# Altium schematic symbol library bspd.SchLib: 16 symbols
Pins are listed as number, name and electrical type; pins without a type are passive.

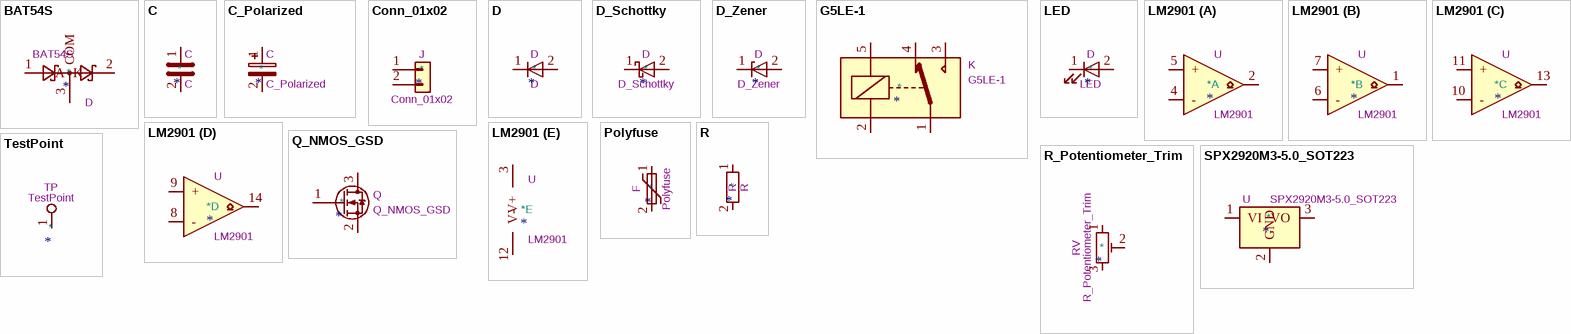
[diagram p0: symbols BAT54S to TestPoint]

## BAT54S
designator *  value BAT54S  Reference: D
ki_keywords: schottky diode; ki_description: Vr 30V, If 200mA, Dual schottky barrier diode, in series, SOT-323; ki_fp_filters: SOT?23*; Footprint: Package_TO_SOT_SMD:SOT-23; Datasheet: https://www.diodes.com/assets/Datasheets/ds11005.pdf
pins: 1 A, 2 K, 3 COM

## C
designator *  value C
ki_keywords: cap capacitor; ki_description: Unpolarized capacitor; ki_fp_filters: C_*; Reference: C; Datasheet: ~
pins: 1, 2

## C_Polarized
designator *  value C_Polarized  Reference: C
ki_keywords: cap capacitor; ki_description: Polarized capacitor; ki_fp_filters: CP_*; Datasheet: ~
pins: 1, 2

## Conn_01x02
designator *  value Conn_01x02  Reference: J
ki_keywords: connector; ki_description: Generic connector, single row, 01x02, script generated (kicad-library-utils/schlib/autogen/connector/); ki_fp_filters: Connector*:*_1x??_*; Datasheet: ~
pins: 1 Pin_1, 2 Pin_2

## D
designator *  value D
Sim.Pins: 1=K 2=A; ki_keywords: diode; ki_fp_filters: TO-???* *_Diode_* *SingleDiode* D_*; Reference: D; Datasheet: ~; Sim.Device: D; ki_description: Diode
pins: 1 K, 2 A

## D_Schottky
designator *  value D_Schottky  Reference: D
ki_keywords: diode Schottky; ki_description: Schottky diode; ki_fp_filters: TO-???* *_Diode_* *SingleDiode* D_*; Datasheet: ~
pins: 1 K, 2 A

## D_Zener
designator *  value D_Zener  Reference: D
ki_keywords: diode; ki_description: Zener diode; ki_fp_filters: TO-???* *_Diode_* *SingleDiode* D_*; Datasheet: ~
pins: 1 K, 2 A

## G5LE-1
designator *  value G5LE-1  Reference: K
ki_keywords: Miniature Single Pole Relay; ki_description: Omron G5LE relay, Miniature Single Pole, SPDT, 10A; ki_fp_filters: Relay*SPDT*Omron*G5LE?1*; Footprint: Relay_THT:Relay_SPDT_Omron-G5LE-1; Datasheet: http://www.omron.com/ecb/products/pdf/en-g5le.pdf
pins: 1, 2, 3, 4, 5

## LED
designator *  value LED  Reference: D
ki_keywords: LED diode; ki_description: Light emitting diode; ki_fp_filters: LED* LED_SMD:* LED_THT:*; Datasheet: ~
pins: 1 K, 2 A

## LM2901
designator *  value LM2901  Reference: U
ki_keywords: cmp open collector; ki_description: Quad Differential Comparators, DIP-14/SOIC-14/TSSOP-14; ki_fp_filters: SOIC*3.9x8.7mm*P1.27mm* DIP*W7.62mm* TSSOP*4.4x5mm*P0.65mm*; Datasheet: https://www.st.com/resource/en/datasheet/lm2901.pdf
part A pins: 2, 4 -, 5 +
part B pins: 1, 6 -, 7 +
part C pins: 10 -, 11 +, 13
part D pins: 8 -, 9 +, 14
part E pins: 3 V+, 12 V-

## Polyfuse
designator *  value Polyfuse  Reference: F
ki_keywords: resettable fuse PTC PPTC polyfuse polyswitch; ki_description: Resettable fuse, polymeric positive temperature coefficient; ki_fp_filters: *polyfuse* *PTC*; Datasheet: ~
pins: 1, 2

## Q_NMOS_GSD
designator *  value Q_NMOS_GSD  Reference: Q
ki_keywords: transistor NMOS N-MOS N-MOSFET; ki_description: N-MOSFET transistor, gate/source/drain; Datasheet: ~
pins: 1 G, 2 S, 3 D

## R
designator *  value R
ki_keywords: R res resistor; ki_description: Resistor; ki_fp_filters: R_*; Reference: R; Datasheet: ~
pins: 1, 2

## R_Potentiometer_Trim
designator *  value R_Potentiometer_Trim  Reference: RV
ki_keywords: resistor variable trimpot trimmer; ki_description: Trim-potentiometer; ki_fp_filters: Potentiometer*; Datasheet: ~
pins: 1, 2, 3

## SPX2920M3-5.0_SOT223
designator *  value SPX2920M3-5.0_SOT223  Reference: U
ki_keywords: REGULATOR LDO 5V; ki_description: 400mA Low drop-out regulator, Fixed Output 5V, SOT-223; ki_fp_filters: SOT?223*; Footprint: Package_TO_SOT_SMD:SOT-223-3_TabPin2; Datasheet: http://www.zlgmcu.com/Sipex/LDO/PDF/spx2920.pdf
pins: 1 VI, 2 GND, 3 VO

## TestPoint
designator *  value TestPoint  Reference: TP
ki_keywords: test point tp; ki_description: test point; ki_fp_filters: Pin* Test*; Datasheet: ~
pins: 1